# Altium footprint library Mosfet$.PcbLib: 62 footprints (part 1 of 4)
Each footprint in its own frame and in the unit in brackets; x right, y up, seen from the top. Pads: shape width x height; smd on the part's side, far side on the other; paste and mask are expansions set on the pad; w line width, h text height; cw(c..) or ccw(c..) is an arc to the next point about the centre after c.
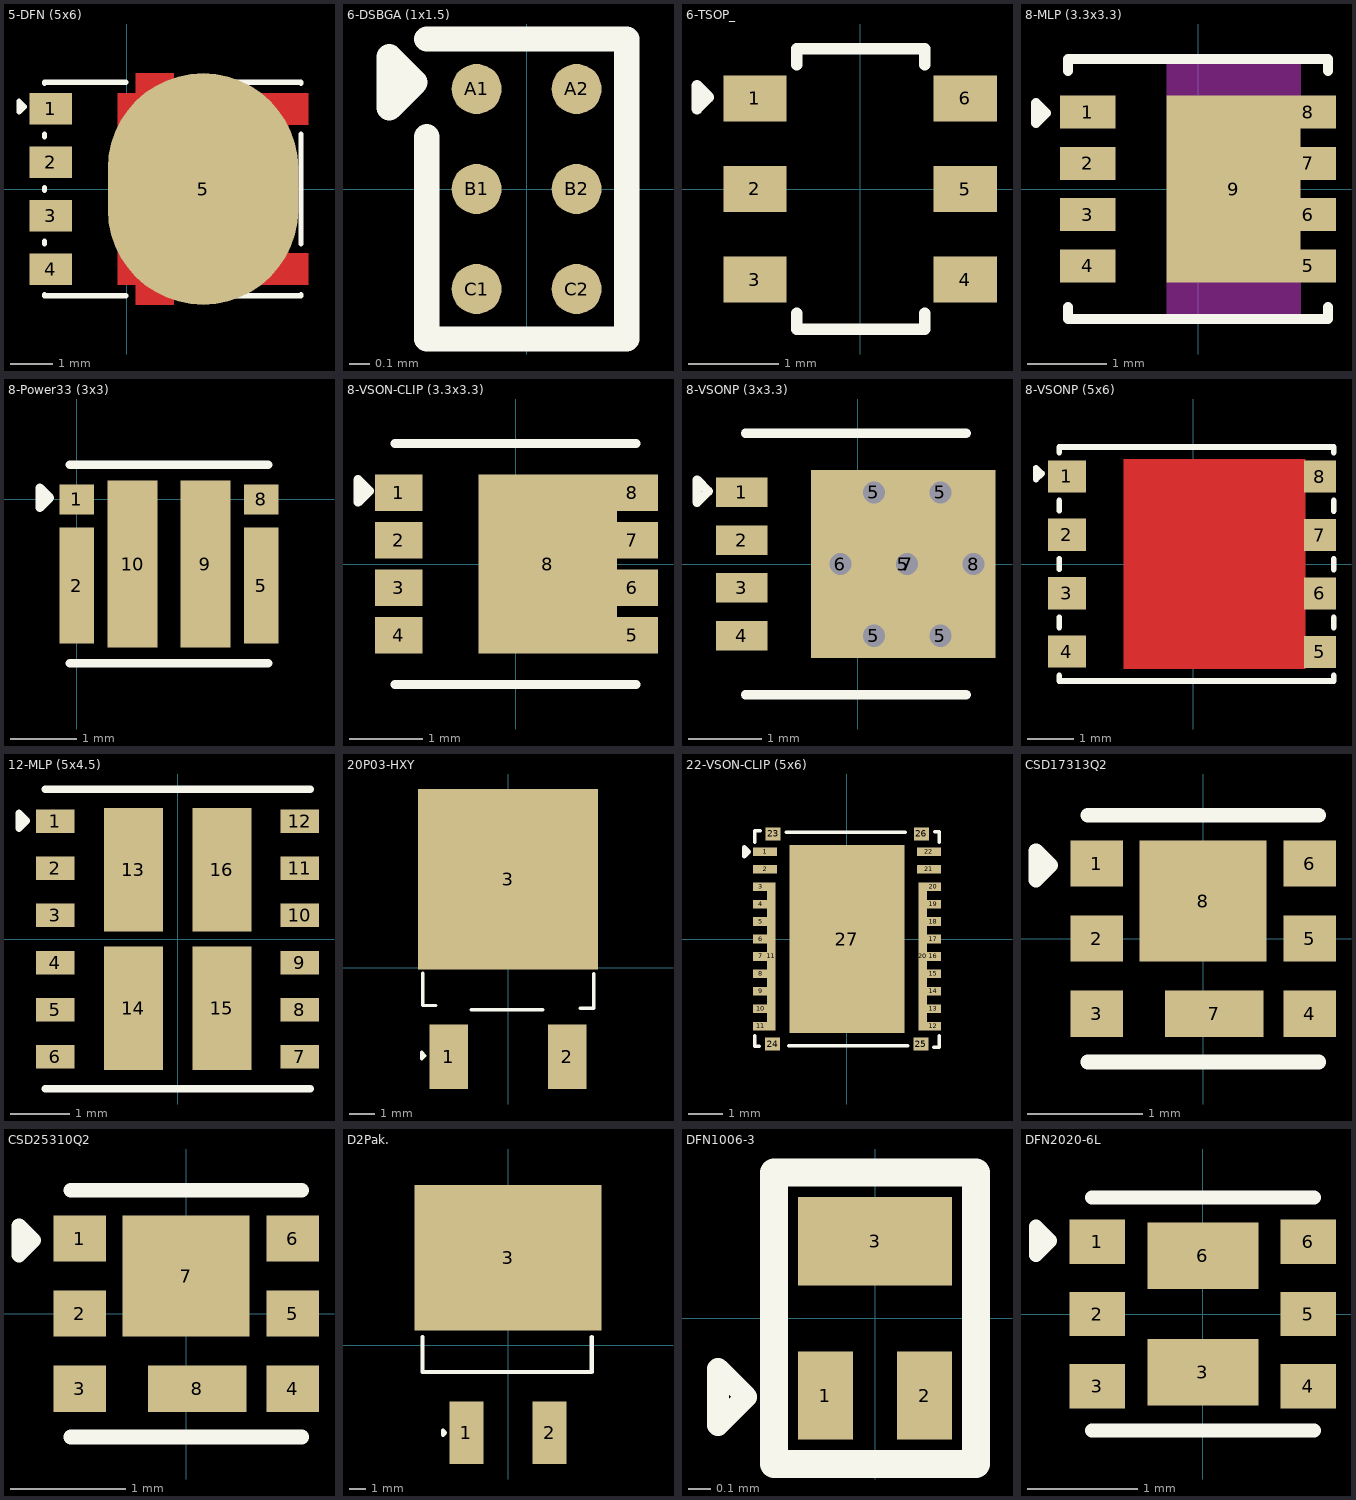
[diagram p0: the footprints below, top view; thin cyan lines are the x and y axes]

## 5-DFN (5x6) [mm]
pads (5):
  rect 1x0.75 smd paste+0 mask+0.051: 1(-1.811,1.905) 2(-1.811,0.635) 3(-1.811,-0.635) 4(-1.811,-1.905)
  oval 4.53x5.51 smd: 5(1.811,0)
Top Layer:
  region: 4.313,2.28 1.113,2.28 1.113,2.755 0.208,2.755 0.208,2.28 -0.217,2.28 -0.217,-2.28 0.208,-2.28 0.208,-2.755 1.113,-2.755 1.113,-2.28 4.313,-2.28 4.313,-1.53 3.838,-1.53 3.838,1.53 4.313,1.53
Top Overlay:
  lines w0.127: -1.959,-2.511 -1.959,-2.54 -0.023,-2.54 ; -1.959,-1.299 -1.959,-1.241 ; -1.959,-0.029 -1.959,0.029 ; -1.959,1.241 -1.959,1.299 ; -1.959,2.511 -1.959,2.54 -0.023,2.54 ; 1.345,-2.54 4.137,-2.54 4.137,-2.511 ; 1.345,2.54 4.137,2.54 4.137,2.511 ; 4.137,-1.299 4.137,1.299 ; -2.565,1.829 -2.565,2.083 -2.438,1.956 -2.565,1.829
3D body "C900259.step": height 1.02, standoff 0, extent -2.008,-2.575 4.186,2.575

## 6-DSBGA (1x1.5) [mm]
pads (6):
  round 0.25 smd mask+0.055: A1(-0.25,0.5) A2(0.25,0.5) B1(-0.25,0) B2(0.25,0) C1(-0.25,-0.5) C2(0.25,-0.5)
Top Overlay:
  lines w0.127: -0.5,0.262 -0.5,-0.75 0.5,-0.75 0.5,0.75 -0.5,0.75 ; -0.686,0.406 -0.686,0.66 -0.559,0.533 -0.686,0.406
3D body "CSD25304W1015.STEP": height 0.6, standoff -0.02, extent -0.508,-0.75 0.492,0.75

## 6-TSOP_ [mil]
pads (6):
  rect 27.52x20 smd: 1(-45.77,39.41) 2(-45.77,0) 3(-45.77,-39.41) 4(45.77,-39.41) 5(45.77,0) 6(45.77,39.41)
Top Overlay:
  lines w5: -27.54,-54 -27.54,-60.98 28,-61 28,-54.02 ; -27.54,54 -27.54,60.98 28,61 28,54.02 ; -71,35 -66,40 -71,45 -71,35
3D body "User Library-TSOP-6.step": height 38.98, standoff -0.39, extent -53.14,-59.06 53.16,59.05

## 8-MLP (3.3x3.3) [mm]
pads (9):
  rect 0.7x0.42 smd: 1(-1.4,0.975) 2(-1.4,0.325) 3(-1.4,-0.325) 4(-1.4,-0.975)
  rect 0.7x0.42 smd paste-1: 5(1.4,-0.975) 6(1.4,-0.325) 7(1.4,0.325) 8(1.4,0.975)
  rect 1.7x2.37 smd paste-2: 9(0.45,0)
Top Overlay:
  lines w0.127: -1.65,-1.5 -1.65,-1.65 1.65,-1.65 1.65,-1.5 ; -1.65,1.5 -1.65,1.65 1.65,1.65 1.65,1.5 ; -2.057,0.838 -1.93,0.965 -2.057,1.092 -2.057,0.838
Top Paste:
  region: 1.75,-1.185 1.3,-1.185 1.3,-0.765 1.75,-0.765
  region: 1.75,-0.535 1.3,-0.535 1.3,-0.115 1.75,-0.115
  region: 1.75,0.115 1.3,0.115 1.3,0.535 1.75,0.535
  region: 1.75,0.765 1.3,0.765 1.3,1.185 1.75,1.185
  region: 1.75,0.765 1.3,0.765 1.3,1.185 1.75,1.185
  region: 0.988,-0.75 -0.087,-0.75 -0.087,0.75 0.988,0.75
Keep-Out Layer:
  region: 1.3,-1.7 -0.4,-1.7 -0.4,-1.185 1.3,-1.185
  region: 1.3,1.185 -0.4,1.185 -0.4,1.7 1.3,1.7
3D body "User Library-MLP-3_3x3_3.STEP": height 0.8, standoff 0, extent -1.65,-1.651 1.65,1.649

## 8-Power33 (3x3) [mm]
pads (6):
  rect 0.52x0.45 smd: 1(0,0) 8(2.78,0)
  rect 0.52x1.75 smd: 2(0,-1.3) 5(2.78,-1.3)
  rect 0.75x2.52 smd: 9(1.94,-0.975) 10(0.84,-0.975)
Top Overlay:
  lines w0.127: -0.11,-2.475 2.89,-2.475 ; -0.11,0.525 2.89,0.525 ; -0.559,-0.127 -0.406,0.025 -0.559,0.178 -0.559,-0.127

## 8-VSON-CLIP (3.3x3.3) [mm]
pads (9):
  rect 0.65x0.5 smd paste-100 mask+0.05: 1(-1.6,0.975) 2(-1.6,0.325) 3(-1.6,-0.325) 4(-1.6,-0.975)
  rect 0.7x0.5 smd paste-100 mask+0.05: 5(1.6,-0.975) 6(1.6,-0.325) 7(1.6,0.325) 8(1.6,0.975)
  rect 1.9x2.45 smd paste-100 mask+0.05: 8(0.44,0)
Top Overlay:
  lines w0.127: -1.651,-1.65 1.649,-1.65 ; -1.651,1.65 1.649,1.65 ; -2.159,0.848 -2.159,1.153 -2.006,1 -2.159,0.848
3D body "CSD17309Q3.step": height 1.1, standoff 0, extent -1.65,-1.65 1.65,1.65

## 8-VSONP (3x3.3) [mm]
pads (12):
  rect 0.7x0.4 smd mask+0.05: 1(-1.576,0.975) 2(-1.576,0.325) 3(-1.576,-0.325) 4(-1.576,-0.975)
  round 0.5 hole 0.3 mask+0: 5(0.219,-0.975) 5(0.219,0.975) 5(1.124,-0.975) 5(1.124,0.975) 6(-0.234,0) 7(0.671,0) 8(1.576,0)
  rect 2.51x2.55 smd mask+0.05: 5(0.619,0)
Top Overlay:
  lines w0.127: -1.526,1.778 1.474,1.778 ; -1.524,-1.778 1.476,-1.778 ; -2.184,0.838 -2.032,0.991 -2.184,1.143 -2.184,0.838
3D body "CSD25402Q3A.step": height 0.9, standoff 0, extent -1.634,-1.725 1.666,1.725

## 8-VSONP (5x6) [mm]
pads (8):
  rect 0.82x0.7 smd paste-100 mask+0.051: 1(-2.75,1.907) 2(-2.75,0.637) 3(-2.75,-0.633) 4(-2.75,-1.903)
  rect 0.7x0.7 smd paste-100 mask+0.051: 5(2.75,-1.907) 6(2.75,-0.638) 7(2.75,0.632) 8(2.75,1.902)
Top Layer:
  rectangle: -1.514,-2.28 2.438,2.28
Top Overlay:
  lines w0.127: -2.917,-2.424 -2.917,-2.538 3.052,-2.538 3.052,-2.419 ; -2.917,-1.381 -2.917,-1.154 ; -2.917,-0.111 -2.917,0.116 ; -2.917,1.159 -2.917,1.386 ; -2.917,2.429 -2.917,2.542 3.052,2.542 3.052,2.423 ; 3.052,-1.376 3.052,-1.159 ; 3.052,-0.117 3.052,0.111 ; 3.052,1.153 3.052,1.381 ; -3.422,1.84 -3.422,2.094 -3.295,1.967 -3.422,1.84
3D body "CSD18504Q5A.step": height 1.1, standoff 0, extent -3,-2.45 3,2.45

## 12-MLP (5x4.5) [mm]
pads (16):
  rect 0.65x0.4 smd: 1(-2.075,2) 2(-2.075,1.2) 3(-2.075,0.4) 4(-2.075,-0.4) 5(-2.075,-1.2) 6(-2.075,-2) 7(2.075,-2) 8(2.075,-1.2) 9(2.075,-0.4) 10(2.075,0.4) 11(2.075,1.2) 12(2.075,2)
  rect 1x2.1 smd paste-2: 13(-0.75,1.175) 14(-0.75,-1.175) 15(0.75,-1.175) 16(0.75,1.175)
Top Overlay:
  lines w0.127: -2.25,-2.538 2.25,-2.538 ; -2.25,2.538 2.25,2.538 ; -2.692,1.88 -2.565,2.007 -2.692,2.134 -2.692,1.88
3D body "step_temp.STEP": height 0.8, standoff 0, extent -2.25,-2.5 2.25,2.5

## 20P03-HXY [mm]
pads (3):
  rect 1.5x2.5 smd: 1(-2.3,-3.45) 2(2.3,-3.45)
  rect 7x7 smd: 3(0,3.45)
Top Overlay:
  lines w0.127: -3.308,-0.203 -3.308,-1.457 -2.794,-1.457 ; -1.422,-1.626 1.346,-1.626 ; 2.794,-1.563 3.329,-1.563 3.329,-0.227 ; -3.353,-3.531 -3.353,-3.277 -3.226,-3.404 -3.353,-3.531
3D body "User Library-DPAK-1.STEP": height 2.34, standoff -0.07, extent -3.27,-4.311 3.27,5.627

## 22-VSON-CLIP (5x6) [mm]
pads (29):
  rect 0.7x0.25 smd paste-100 mask+0.05: 1(-2.35,2.5) 2(-2.35,2) 21(2.35,2) 22(2.35,2.5)
  rect 0.45x0.25 smd paste-100 mask+0.05: 3(-2.475,1.5) 4(-2.475,1) 5(-2.475,0.5) 6(-2.475,0) 7(-2.475,-0.5) 8(-2.475,-1) 9(-2.475,-1.5) 10(-2.475,-2) 11(-2.475,-2.5) 12(2.475,-2.5) 13(2.475,-2) 14(2.475,-1.5) 15(2.475,-1) 16(2.475,-0.5) 17(2.475,0) 18(2.475,0.5) 19(2.475,1) 20(2.475,1.5)
  rect 0.25x4.25 smd paste-100 mask+0.05: 11(-2.175,-0.5) 20(2.175,-0.5)
  rect 0.43x0.375 smd paste-100 mask+0.05: 23(-2.115,3.013) 24(-2.135,-3.013) 25(2.115,-3.013) 26(2.135,3.013)
  rect 3.3x5.4 smd paste-100 mask+0.05: 27(0,0)
Top Overlay:
  lines w0.1: -2.64,-2.78 -2.64,-3.07 -2.52,-3.07 ; -2.64,2.779 -2.64,3.1 -2.484,3.1 ; -1.746,3.06 1.67,3.06 ; -1.67,-3.06 1.746,-3.06 ; 2.484,-3.1 2.64,-3.1 2.64,-2.779 ; 2.52,3.07 2.64,3.07 2.64,2.78
  lines w0.127: -2.946,2.375 -2.819,2.502 -2.946,2.629 -2.946,2.375
Top Paste:
  region: -2.75,-2.625 -2.05,-2.625 -2.05,1.625 -2.75,1.625 -2.75,1.375 -2.3,1.375 -2.3,1.125 -2.75,1.125 -2.75,0.875 -2.3,0.875 -2.3,0.625 -2.75,0.625 -2.75,0.375 -2.3,0.375 -2.3,0.125 -2.75,0.125 -2.75,-0.125 -2.3,-0.125 -2.3,-0.375 -2.75,-0.375 -2.75,-0.625 -2.3,-0.625 -2.3,-0.875 -2.75,-0.875 -2.75,-1.125 -2.3,-1.125 -2.3,-1.375 -2.75,-1.375 -2.75,-1.625 -2.3,-1.625 -2.3,-1.875 -2.75,-1.875 -2.75,-2.125 -2.3,-2.125 -2.3,-2.375 -2.75,-2.375
  region: 2.75,1.625 2.05,1.625 2.05,-2.625 2.75,-2.625 2.75,-2.375 2.3,-2.375 2.3,-2.125 2.75,-2.125 2.75,-1.875 2.3,-1.875 2.3,-1.625 2.75,-1.625 2.75,-1.375 2.3,-1.375 2.3,-1.125 2.75,-1.125 2.75,-0.875 2.3,-0.875 2.3,-0.625 2.75,-0.625 2.75,-0.375 2.3,-0.375 2.3,-0.125 2.75,-0.125 2.75,0.125 2.3,0.125 2.3,0.375 2.75,0.375 2.75,0.625 2.3,0.625 2.3,0.875 2.75,0.875 2.75,1.125 2.3,1.125 2.3,1.375 2.75,1.375
  region: -2.7,1.875 -2.7,2.125 -2,2.125 -2,1.875
  region: -2.7,2.375 -2.7,2.625 -2,2.625 -2,2.375
  region: 2,1.875 2,2.125 2.7,2.125 2.7,1.875
  region: 2,2.375 2,2.625 2.7,2.625 2.7,2.375
  region: 1.9,-3.201 1.9,-2.825 2.33,-2.825 2.33,-3.201
  region: -2.35,-3.201 -2.35,-2.826 -1.92,-2.826 -1.92,-3.201
  region: -2.33,2.825 -2.33,3.2 -1.9,3.2 -1.9,2.825
  region: 1.92,2.825 1.92,3.201 2.35,3.201 2.35,2.825
  region: -1.65,-2.7 -1.65,2.7 1.65,2.7 1.65,-2.7
3D body "CSD88584Q5DC.step": height 1.05, standoff 0, extent -2.5,-3 2.5,3

## CSD17313Q2 [mm] "6-WSON (2x2)"
pads (8):
  rect 0.455x0.4 smd paste-1: 1(-0.923,0.65) 2(-0.923,0) 3(-0.923,-0.65) 4(0.923,-0.65) 5(0.923,0) 6(0.923,0.65)
  rect 0.85x0.4 smd paste-0.05: 7(0.096,-0.65)
  rect 1.1x1.05 smd paste-0.05: 8(0,0.325)
Top Overlay:
  lines w0.127: -1,-1.068 1,-1.068 ; -1,1.068 1,1.068 ; -1.448,0.508 -1.448,0.762 -1.321,0.635 -1.448,0.508
3D body "CSD17313Q2--3DModel-STEP-231308.STEP": height 0.8, standoff 0, extent -1,-1 1,1

## CSD25310Q2 [mm]
pads (8):
  rect 0.455x0.4 smd paste-1: 1(-0.923,0.65) 2(-0.923,0) 3(-0.923,-0.65) 4(0.923,-0.65) 5(0.923,0) 6(0.923,0.65)
  rect 1.1x1.05 smd paste-0.05: 7(0,0.325)
  rect 0.85x0.4 smd paste-0.05: 8(0.096,-0.65)
Top Overlay:
  lines w0.127: -1,-1.068 1,-1.068 ; -1,1.068 1,1.068 ; -1.448,0.508 -1.448,0.762 -1.321,0.635 -1.448,0.508
3D body "CSD17313Q2--3DModel-STEP-231308.STEP": height 0.8, standoff 0, extent -1,-1 1,1

## D2Pak. [mm]
pads (3):
  rect 2.08x3.81 smd: 1(-2.54,-5.335) 2(2.54,-5.335)
  rect 11.43x8.89 smd: 3(0,5.335)
Top Overlay:
  lines w0.254: -5.207,0.508 -5.207,-1.626 5.105,-1.626 5.105,0.508 ; -3.962,-5.461 -3.962,-5.207 -3.835,-5.334 -3.962,-5.461
3D body "pwr263s-35-8r20f.stp": height 4.5, standoff 0, extent -5.075,-6.596 5.025,8.794

## DFN1006-3 [mm]
pads (3):
  rect 0.25x0.4 smd: 1(-0.225,-0.35) 2(0.225,-0.35)
  rect 0.7x0.4 smd: 3(0,0.35)
Top Overlay:
  lines w0.1: -0.711,-0.483 -0.711,-0.229 -0.584,-0.356 -0.711,-0.483
  lines w0.127: -0.457,-0.66 0.457,-0.66 0.457,0.66 -0.457,0.66 -0.457,-0.66
3D body "MMBT3904LP-7--3DModel-STEP-56544.STEP": height 0.53, standoff 0, extent -0.3,-0.5 0.3,0.5

## DFN2020-6L [mm]
pads (8):
  rect 0.5x0.4 smd paste+0 mask+0.051: 1(-0.95,0.65) 2(-0.95,0) 3(-0.95,-0.65) 4(0.95,-0.65) 5(0.95,0) 6(0.95,0.65)
  rect 1x0.6 smd paste+0 mask+0.051: 3(0,-0.525) 6(0,0.525)
Top Overlay:
  lines w0.127: -1,-1.049 1,-1.049 ; -1,1.049 1,1.049 ; -1.503,0.533 -1.376,0.66 -1.503,0.787 -1.503,0.533
3D body "C3288247.step": height 0.62, standoff 0, extent -1.01,-1 1.01,1